# Altium schematic symbol library LD2980ABM50TR.SchLib: 1 symbol
Pins are listed as number, name and electrical type; pins without a type are passive.

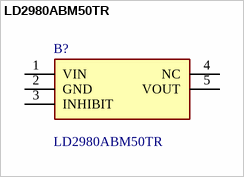
[diagram p0: symbol LD2980ABM50TR]

## LD2980ABM50TR
designator B?
LDO Regulator 5V 0.05A SOT23-5 LD2980ABM50TR, Low Dropout Voltage Regulator, 0.05A, 5 V +/-0.5%, -3  16 Vin, 5-Pin SOT-23; Manufacturer_Name: STMicroelectronics; Geometry.Height: 1.45mm; Manufacturer_Part_Number: LD2980ABM50TR; Mouser Part Number: 511-LD2980ABM50; Mouser Price/Stock: https://www.mouser.co.uk/ProductDetail/STMicroelectronics/LD2980ABM50TR?qs=VGvuQyhlB505oN%2FiomLdRQ%3D%3D; Arrow Part Number: LD2980ABM50TR; Arrow Price/Stock: https://www.arrow.com/en/products/ld2980abm50tr/stmicroelectronics?utm_currency=USD&region=europe; Datasheet Link: https://www.st.com/resource/en/datasheet/ld2980.pdf
footprint SOT95P280X145-5N
pins: 1 VIN, 2 GND (power), 3 INHIBIT, 4 NC, 5 VOUT